# Altium schematic symbol library UNIV_CAP.SchLib: 1 symbol
Pins are listed as number, name and electrical type; pins without a type are passive.

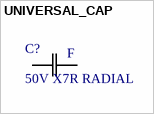
[diagram p0: symbol UNIVERSAL_CAP]

## UNIVERSAL_CAP
designator C?, comment 50V X7R RADIAL  value F
CAP CER ?UF 50V X7R RADIAL; Copyright: Copyright (C) 2026 Ultra Librarian. All rights reserved.; Manufacturer: *; Manufacturer_Part_Number: *
footprint PCBComponent_1
pins: 1, 2